# EAGLE library part SM06B-GHS-TB_LF__SN_ (library SM06B-GHS-TB_LF__SN_)
GH 1.25mm header side entry 6 way JST GH Series, 1.25mm Pitch 6 Way Right Angle PCB Header, Solder Termination, 1A Source: Datasheet <https://datasheet.datasheetarchive.com/originals/distributors/Datasheets_SAMA/e4ef010dc292ea31091454f6c0afb63a.pdf>
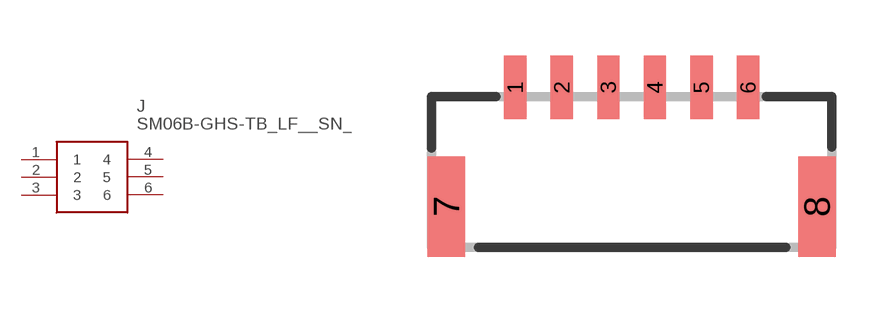
[diagram p0: symbol with the pads of SM06B-GHS-TB; footprint SM06B-GHS-TB]

Designator prefix J

## SM06B-GHS-TB_LF__SN_ (Description: GH 1.25mm header side entry 6 way JST GH Series, 1.25mm Pitch 6 Way Right Angle PCB Header, Solder Termination, 1A; Height: mm; Manufacturer_Name: JST (JAPAN SOLDERLESS TERMINALS); Manufacturer_Part_Number: SM06B-GHS-TB(LF)(SN); Mouser_Part_Number: N/A; Mouser_Price-Stock: https://www.mouser.co.uk/ProductDetail/JST-Commercial/SM06B-GHS-TBLFSN?qs=QpmGXVUTftFzTQe43vH9Ig%3D%3D)  [SM06B-GHS-TB]
1  1
2  2
3  3
4  4
5  5
6  6

## Footprint SM06B-GHS-TB (pad centres in mm)
SM06B-GHS-TB
smd 0.6 x 1.7: 1 2.25,4.3; 2 3.5,4.3; 3 4.75,4.3; 4 6,4.3; 5 7.25,4.3; 6 8.5,4.3
smd 1 x 2.7: 7 0.4,1.1; 8 10.35,1.1